# Altium schematic symbol library CON_PCIe_X4.SchLib: 22 symbols
Pins are listed as number, name and electrical type; pins without a type are passive.

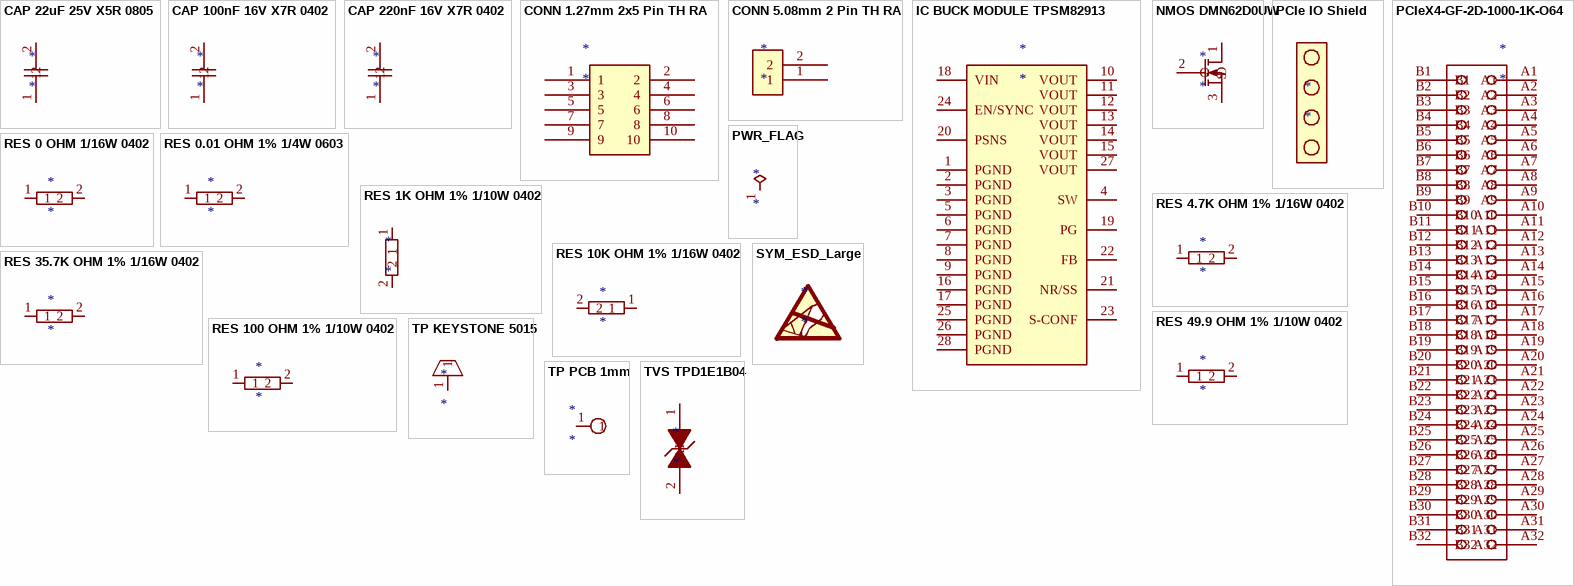
[diagram p0: symbols CAP 22uF 25V X5R 0805 to TVS TPD1E1B04]

## CAP 22uF 25V X5R 0805
designator *
pins: 1, 2

## CAP 100nF 16V X7R 0402
designator *
pins: 1, 2

## CAP 220nF 16V X7R 0402
designator *
pins: 1, 2

## CONN 1.27mm 2x5 Pin TH RA
designator *
pins: 1, 2, 3, 4, 5, 6, 7, 8, 9, 10

## CONN 5.08mm 2 Pin TH RA
designator *
pins: 1, 2

## IC BUCK MODULE TPSM82913
designator *
pins: 1 PGND, 2 PGND, 3 PGND, 4 SW, 5 PGND, 6 PGND, 7 PGND, 8 PGND, 9 PGND, 10 VOUT, 11 VOUT, 12 VOUT, 13 VOUT, 14 VOUT, 15 VOUT, 16 PGND, 17 PGND, 18 VIN, 19 PG, 20 PSNS, 21 NR/SS, 22 FB, 23 S-CONF, 24 EN/SYNC, 25 PGND, 26 PGND, 27 VOUT, 28 PGND

## NMOS DMN62D0UW
designator *
pins: 1 D, 2 G, 3 S

## PCIe IO Shield
designator *

## PCIeX4-GF-2D-1000-1K-O64
designator *
pins: A1, A2, A3, A4, A5, A6, A7, A8, A9, A10, A11, A12, A13, A14, A15, A16, A17, A18, A19, A20, A21, A22, A23, A24, A25, A26, A27, A28, A29, A30, A31, A32, B1, B2, B3, B4, B5, B6, B7, B8, B9, B10, B11, B12, B13, B14, B15, B16, B17, B18, B19, B20, B21, B22, B23, B24, B25, B26, B27, B28, B29, B30, B31, B32

## PWR_FLAG
designator *  (graphical)
pins: 1

## RES 0 OHM 1/16W 0402
designator *
pins: 1, 2

## RES 0.01 OHM 1% 1/4W 0603
designator *
pins: 1, 2

## RES 1K OHM 1% 1/10W 0402
designator *
pins: 1, 2

## RES 4.7K OHM 1% 1/16W 0402
designator *
pins: 1, 2

## RES 10K OHM 1% 1/16W 0402
designator *
pins: 1, 2

## RES 35.7K OHM 1% 1/16W 0402
designator *
pins: 1, 2

## RES 49.9 OHM 1% 1/10W 0402
designator *
pins: 1, 2

## RES 100 OHM 1% 1/10W 0402
designator *
pins: 1, 2

## SYM_ESD_Large
designator *

## TP KEYSTONE 5015
designator *
pins: 1

## TP PCB 1mm
designator *
pins: 1

## TVS TPD1E1B04
designator *
pins: 1 K, 2 A